# Altium footprint library LimeMicroAltiumLib.PcbLib: 876 footprints (part 56 of 57)
Each footprint in its own frame and in the unit in brackets; x right, y up, seen from the top. Pads: shape width x height; smd on the part's side, far side on the other; paste and mask are expansions set on the pad; w line width, h text height; cw(c..) or ccw(c..) is an arc to the next point about the centre after c.
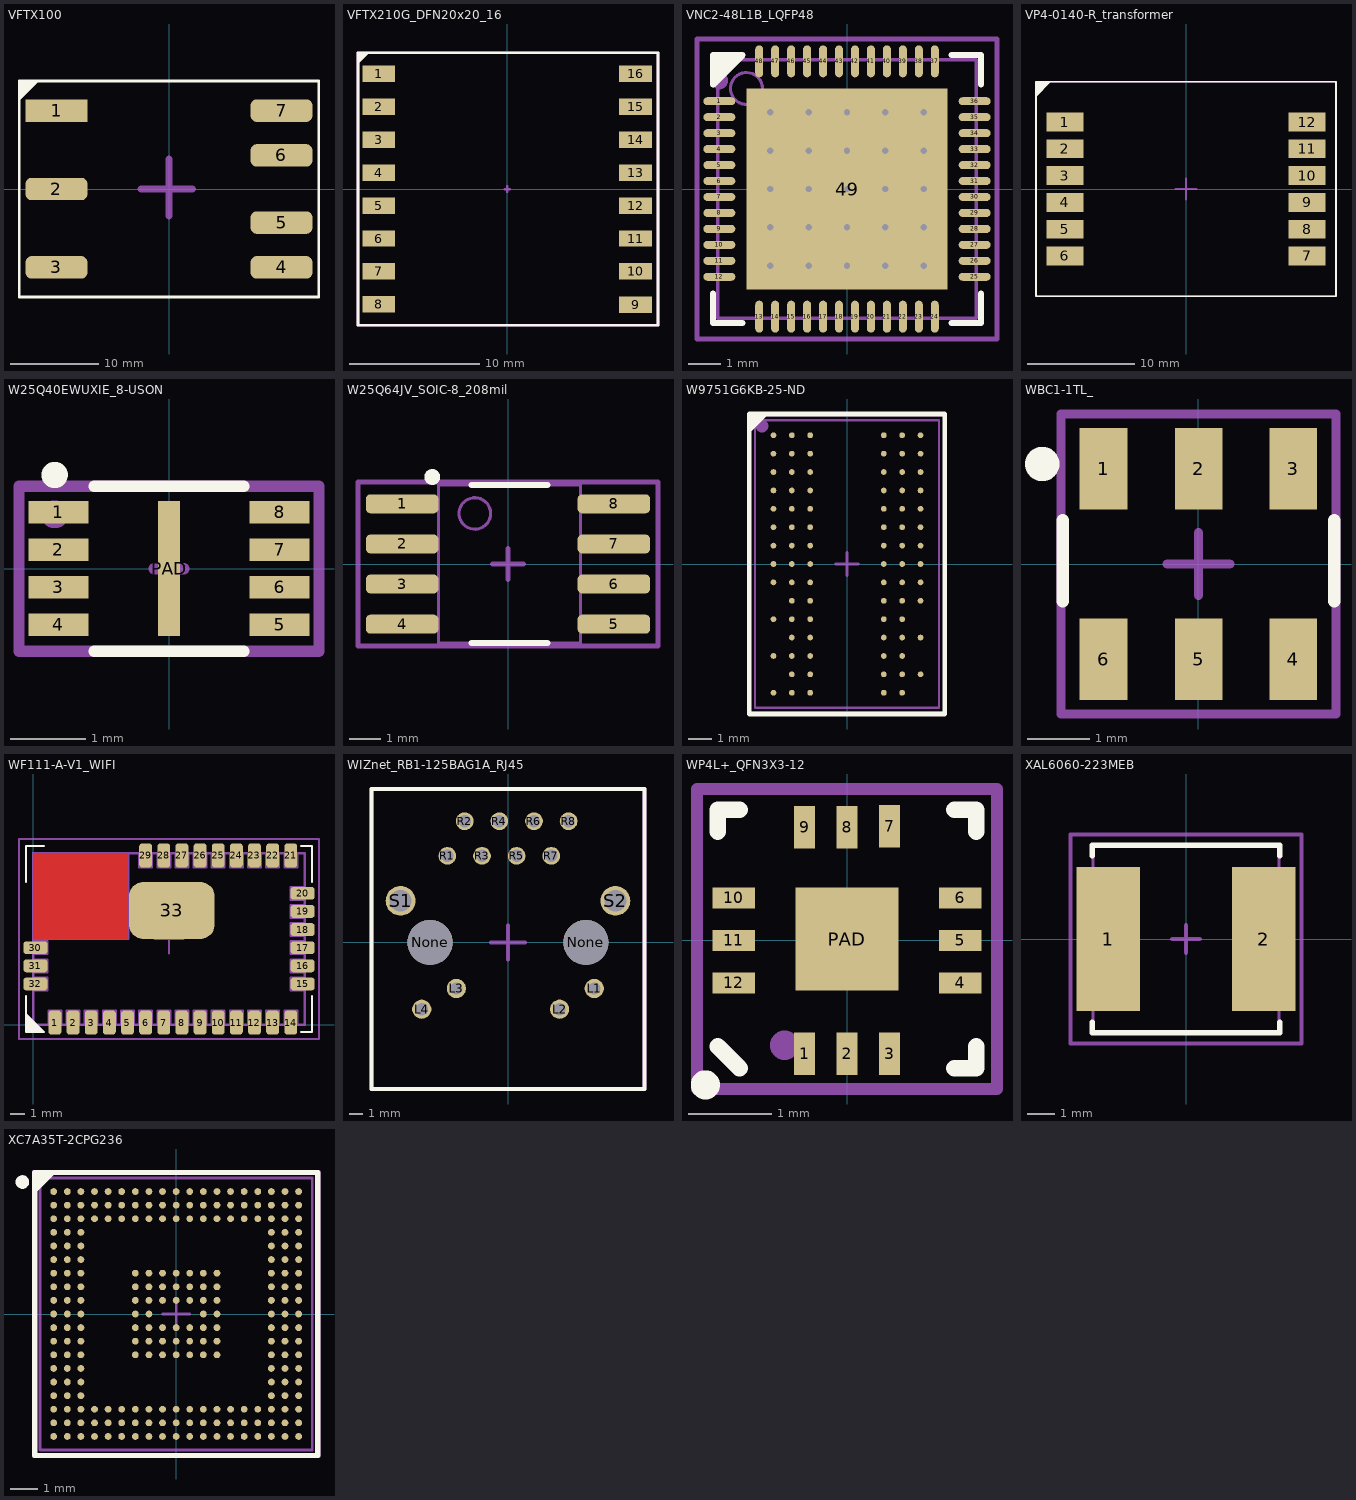
[diagram p55: the footprints below, top view; thin cyan lines are the x and y axes]

## uSpark_BODY_MECH [mm]
3D body "User Library-SMA Antenna.step": height 86.97, standoff 0, extent 52.475,-10.425 83.375,-0.425
3D body "User Library-SMA Antenna.step": height 86.97, standoff 0, extent 52.475,-24.75 83.375,-14.75
3D body "User Library-SMA Antenna.step": height 86.97, standoff 0, extent 52.475,3.325 83.375,13.325
3D body "User Library-SMA Antenna.step": height 86.97, standoff 0, extent 52.5,17.65 83.4,27.65
3D body "1455A1002.stp": height 9.37, standoff -2.63, extent -53.525,-34.611 52.475,35.391

## uSpark_BODY_PANEL_MECH [mm]
3D body: height 6, standoff 0, extent 50,-26 51.5,29
3D body "User Library-SMA-2.step": height 8.25, standoff -2.25, extent 23.85,-25.025 58.85,-14.525
3D body "User Library-SMA-2.step": height 8.25, standoff -2.25, extent 23.85,-10.7 58.85,-0.2
3D body "User Library-SMA-2.step": height 8.25, standoff -2.25, extent 23.85,3.05 58.85,13.55
3D body "User Library-SMA-2.step": height 8.25, standoff -2.25, extent 23.875,17.375 58.875,27.875
3D body "User Library-SMA Antenna.step": height 84.97, standoff -2, extent 52.475,-10.425 83.375,-0.425
3D body "User Library-SMA Antenna.step": height 84.97, standoff -2, extent 52.475,-24.75 83.375,-14.75
3D body "User Library-SMA Antenna.step": height 84.97, standoff -2, extent 52.475,3.325 83.375,13.325
3D body "User Library-SMA Antenna.step": height 84.97, standoff -2, extent 52.5,17.65 83.4,27.65

## VFTX100 [mm]
pads (7):
  rect 7x2.54 smd: 1(-12.763,8.89)
  rrect50% 7x2.54 smd: 2(-12.764,0) 3(-12.764,-8.89) 4(12.764,-8.89) 5(12.764,-3.81) 6(12.763,3.81) 7(12.764,8.89)
Top Overlay:
  region: -17,12.25 -14.75,12.25 -17,10
  lines w0.3: -17,-12.25 -17,12.25 17,12.25 17,-12.25 -17,-12.25
Mechanical 15:
  lines w0.2: -17.018,-12.25 -17.018,12.25 17.018,12.25 17.018,-12.25 -17.018,-12.25
  lines w0.8: -3.175,0.025 0,0.025 ; 0,-3.087 0,0 ; 0,3.429 0,0.025 ; 2.667,0.025 0,0.025
  text "7" at 12,8.25 h1
  text "4" at 12,-9.75 h1
  text "3" at -13.5,-9.5 h1
  text "1" at -13.5,7.75 h1
  text ".Designator" at 0,0 h3
3D body: height 6.73, standoff 0, extent -12.827,-11.176 12.827,11.176

## VFTX210G_DFN20x20_16 [mm]
pads (16):
  rect 2.54x1.27 smd: 1(-9.9,8.9) 2(-9.9,6.35) 3(-9.9,3.81) 4(-9.9,1.27) 5(-9.9,-1.27) 6(-9.9,-3.81) 7(-9.9,-6.35) 8(-9.9,-8.89) 9(9.9,-8.9) 10(9.9,-6.35) 11(9.9,-3.81) 12(9.9,-1.27) 13(9.9,1.27) 14(9.9,3.81) 15(9.9,6.35) 16(9.9,8.9)
Top Overlay:
  region: -11.5,9.65 -10.638,10.512 -11.5,10.513
  lines w0.2: -11.5,-10.5 -11.5,10.5 11.625,10.5 11.625,-10.5 -11.5,-10.5
Mechanical 15:
  circle w0.254: c-9.9,8.9 r0.106
  lines w0.2: -0.2,0 0,0 ; 0,-0.2 0,0 ; 0,0.2 0,0 ; 0.2,0 0,0 ; -11.5,-10.5 -11.5,10.5 11.625,10.5 11.625,-10.5 -11.5,-10.5
  text ".Designator" at 0,0 h0.55
  text "1" at 9.8,8.6 h0.55
3D body: height 6.01, standoff 0, extent -8.492,6.502 -6.5,8.498
3D body: height 6, standoff 0, extent -10,-10 10,10

## VNC2-48L1B_LQFP48 [mm] "VNC2-48L1B chip with LQFP-48 package"
pads (49):
  oval 1x0.25 smd mask+0.05: 1(-4,2.75) 2(-4,2.25) 3(-4,1.75) 4(-4,1.25) 5(-4,0.75) 6(-4,0.25) 7(-4,-0.25) 8(-4,-0.75) 9(-4,-1.25) 10(-4,-1.75) 11(-4,-2.25) 12(-4,-2.75) 25(4,-2.75) 26(4,-2.25) 27(4,-1.75) 28(4,-1.25) 29(4,-0.75) 30(4,-0.25) 31(4,0.25) 32(4,0.75) 33(4,1.25) 34(4,1.75) 35(4,2.25) 36(4,2.75)
  oval 0.25x1 smd mask+0.05: 13(-2.75,-4) 14(-2.25,-4) 15(-1.75,-4) 16(-1.25,-4) 17(-0.75,-4) 18(-0.25,-4) 19(0.25,-4) 20(0.75,-4) 21(1.25,-4) 22(1.75,-4) 23(2.25,-4) 24(2.75,-4) 37(2.75,4) 38(2.25,4) 39(1.75,4) 40(1.25,4) 41(0.75,4) 42(0.25,4) 43(-0.25,4) 44(-0.75,4) 45(-1.25,4) 46(-1.75,4) 47(-2.25,4) 48(-2.75,4)
  rect 6.3x6.3 smd: 49(0,0)
via -2.4,2.4 diameter 0.4 hole 0.2
via -1.2,2.4 diameter 0.4 hole 0.2
via 0,2.4 diameter 0.4 hole 0.2
via 1.2,2.4 diameter 0.4 hole 0.2
via 2.4,2.4 diameter 0.4 hole 0.2
via -2.4,1.2 diameter 0.4 hole 0.2
via -1.2,1.2 diameter 0.4 hole 0.2
via 0,1.2 diameter 0.4 hole 0.2
via 1.2,1.2 diameter 0.4 hole 0.2
via 2.4,1.2 diameter 0.4 hole 0.2
via -2.4,0 diameter 0.4 hole 0.2
via -1.2,0 diameter 0.4 hole 0.2
via 0,0 diameter 0.4 hole 0.2
via 1.2,0 diameter 0.4 hole 0.2
via 2.4,0 diameter 0.4 hole 0.2
via -2.4,-1.2 diameter 0.4 hole 0.2
via -1.2,-1.2 diameter 0.4 hole 0.2
via 0,-1.2 diameter 0.4 hole 0.2
via 1.2,-1.2 diameter 0.4 hole 0.2
via 2.4,-1.2 diameter 0.4 hole 0.2
via -2.4,-2.4 diameter 0.4 hole 0.2
via -1.2,-2.4 diameter 0.4 hole 0.2
via 0,-2.4 diameter 0.4 hole 0.2
via 1.2,-2.4 diameter 0.4 hole 0.2
via 2.4,-2.4 diameter 0.4 hole 0.2
Top Overlay:
  region: -4.2,3.2 -3.2,4.2 -4.2,4.2
  lines w0.2: -4.2,-3.275 -4.2,-4.2 -3.275,-4.2 ; 3.275,-4.2 4.2,-4.2 4.2,-3.275 ; 3.275,4.2 4.2,4.2 4.2,3.275 ; -4.2,3.275 -3.275,4.2 -4.2,4.2 -4.2,3.275
Mechanical 13:
  circle w0.1: c-3.15,3.15 r0.5
  lines w0.1: -4.05,-4.05 -4.05,4.05 4.05,4.05 4.05,-4.05 -4.05,-4.05
Mechanical 15:
  circle w0.35: c-4,3.4 r0.1
  lines w0.15: -0.5,0 0.5,0 ; 0,-0.5 0,0.5 ; -4.7,-4.7 -4.7,4.7 4.7,4.7 4.7,-4.7 -4.7,-4.7
  text ".Designator" at 0,0 h0.55
3D body: height 1, standoff 0, extent -4.05,-4.05 4.05,4.05

## VP4-0140-R_transformer [mm]
pads (12):
  rect 3.43x1.75 smd mask+0.05: 1(-11.3,6.25) 2(-11.3,3.75) 3(-11.3,1.25) 4(-11.3,-1.25) 5(-11.3,-3.75) 6(-11.3,-6.25) 7(11.3,-6.25) 8(11.3,-3.75) 9(11.3,-1.25) 10(11.3,1.25) 11(11.3,3.75) 12(11.3,6.25)
Top Overlay:
  region: -14,8.625 -12.625,10 -14,10
  lines w0.15: -14,-10 14,-10 14,10 -14,10 -14,-10
Mechanical 15:
  lines w0.15: -1,0 1,0 ; 0,-1 0,1 ; -14,-10 14,-10 14,10 -14,10 -14,-10
  text ".Designator" at 0,0 h0.55
  text "1" at -11.5,6 h0.55
  text "6" at -11.5,-6.5 h0.55
  text "7" at 11.5,-6.5 h0.55
  text "12" at 11.5,6 h0.55
3D body: height 2, standoff 0, extent 9,5.9 12.3,6.6
3D body: height 2, standoff 0, extent 9,3.4 12.3,4.1
3D body: height 2, standoff 0, extent 9,0.9 12.3,1.6
3D body: height 2, standoff 0, extent 9,-1.6 12.3,-0.9
3D body: height 2, standoff 0, extent 9,-4.1 12.3,-3.4
3D body: height 2, standoff 0, extent 9,-6.6 12.3,-5.9
3D body: height 2, standoff 0, extent -12.3,-6.6 -9,-5.9
3D body: height 2, standoff 0, extent -12.3,-4.1 -9,-3.4
3D body: height 2, standoff 0, extent -12.3,-1.6 -9,-0.9
3D body: height 2, standoff 0, extent -12.3,0.9 -9,1.6
3D body: height 2, standoff 0, extent -12.3,3.4 -9,4.1
3D body: height 2, standoff 0, extent -12.3,5.9 -9,6.6
3D body: height 10, standoff 0, extent -9,-9 9,9

## W25Q40EWUXIE_8-USON [mm]
pads (9):
  rect 0.8x0.3 smd mask+0.05: 1(-1.475,0.75) 2(-1.475,0.25) 3(-1.475,-0.25) 4(-1.475,-0.75) 5(1.475,-0.75) 6(1.475,-0.25) 7(1.475,0.25) 8(1.475,0.75)
  rect 0.3x1.8 smd mask+0.05: PAD(0,0)
Top Overlay:
  circle w0.3: c-1.525,1.25 r0.025
  lines w0.15: -1,-1.1 1,-1.1 ; -1,1.1 1,1.1
Mechanical 15:
  circle w0.3: c-1.525,0.725 r0.035
  lines w0.15: -0.2,0 0.2,0 ; 0,-0.2 0,0.2 ; -2,-1.1 -2,1.1 2,1.1 2,-1.1 -2,-1.1
  text ".Designator" at 0,0 h0.55
3D body "User Library-8MA3.step": height 0.6, standoff 0, extent -1.51,-1 1.51,1

## W25Q64JV_SOIC-8_208mil [mm] "8-Pin Small Outline Integrated Circuit 1.27 mm Pitch"
height 1.55
pads (8):
  rrect50% 2.3x0.6 smd: 1(-3.35,1.905) 2(-3.35,0.635) 3(-3.35,-0.635) 4(-3.35,-1.905) 5(3.35,-1.905) 6(3.35,-0.635) 7(3.35,0.635) 8(3.35,1.905)
Top Overlay:
  circle w0.25: c-2.4,2.755 r0.125
  lines w0.2: -1.15,-2.5 1.25,-2.5 ; -1.15,2.5 1.25,2.5
Mechanical 13:
  circle w0.1: c-1.05,1.6 r0.5
  lines w0.1: -2.2,-2.5 -2.2,2.5 2.3,2.5 2.3,-2.5 -2.2,-2.5
Mechanical 15:
  circle w0.35: c-3.05,1.9 r0.1
  lines w0.15: -0.5,0 0.5,0 ; 0,-0.5 0,0.5 ; -4.75,-2.6 -4.75,2.6 4.75,2.6 4.75,-2.6 -4.75,-2.6
  text ".Designator" at 0,0 h0.55
3D body "User Library-SOIC8_Wide_5mmx5mm.step": height 1.75, standoff -0.01, extent -4.002,-2.73 4.1,2.73

## W9751G6KB-25-ND [mm] "BGA, 84-Leads, Body 8,00x12,50mmx1,20mm, Pitch 0,80mm"
height 1.2
pads (84):
  round 0.25 smd: A1(-3.2,5.6) A2(-2.4,5.6) A3(-1.6,5.6) A7(1.6,5.6) A8(2.4,5.6) A9(3.2,5.6) B1(-3.2,4.8) B2(-2.4,4.8) B3(-1.6,4.8) B7(1.6,4.8) B8(2.4,4.8) B9(3.2,4.8) C1(-3.2,4) C2(-2.4,4) C3(-1.6,4) C7(1.6,4) C8(2.4,4) C9(3.2,4) D1(-3.2,3.2) D2(-2.4,3.2) D3(-1.6,3.2) D7(1.6,3.2) D8(2.4,3.2) D9(3.2,3.2) E1(-3.2,2.4) E2(-2.4,2.4) E3(-1.6,2.4) E7(1.6,2.4) E8(2.4,2.4) E9(3.2,2.4) F1(-3.2,1.6) F2(-2.4,1.6) F3(-1.6,1.6) F7(1.6,1.6) F8(2.4,1.6) F9(3.2,1.6) G1(-3.2,0.8) G2(-2.4,0.8) G3(-1.6,0.8) G7(1.6,0.8) G8(2.4,0.8) G9(3.2,0.8) H1(-3.2,0) H2(-2.4,0) H3(-1.6,0) H7(1.6,0) H8(2.4,0) H9(3.2,0) J1(-3.2,-0.8) J2(-2.4,-0.8) J3(-1.6,-0.8) J7(1.6,-0.8) J8(2.4,-0.8) J9(3.2,-0.8) K2(-2.4,-1.6) K3(-1.6,-1.6) K7(1.6,-1.6) K8(2.4,-1.6) K9(3.2,-1.6) L1(-3.2,-2.4) L2(-2.4,-2.4) L3(-1.6,-2.4) L7(1.6,-2.4) L8(2.4,-2.4) M2(-2.4,-3.2) M3(-1.6,-3.2) M7(1.6,-3.2) M8(2.4,-3.2) M9(3.2,-3.2) N1(-3.2,-4) N2(-2.4,-4) N3(-1.6,-4) N7(1.6,-4) N8(2.4,-4) P2(-2.4,-4.8) P3(-1.6,-4.8) P7(1.6,-4.8) P8(2.4,-4.8) P9(3.2,-4.8) R1(-3.2,-5.6) R2(-2.4,-5.6) R3(-1.6,-5.6) R7(1.6,-5.6) R8(2.4,-5.6)
Top Overlay:
  region: -3.542,6.525 -4.25,5.817 -4.25,6.525
  lines w0.2: -4.25,5.817 -3.542,6.525 ; -4.25,-6.525 -4.25,6.525 4.25,6.525 4.25,-6.525 -4.25,-6.525
Mechanical 13:
  lines w0.1: -4,-6.25 -4,6.25 4,6.25 4,-6.25 -4,-6.25
Mechanical 15:
  circle w0.35: c-3.7,6 r0.1
  lines w0.15: -0.5,0 0,0 ; 0,-0.5 0,0 ; 0,0.5 0,0 ; 0.5,0 0,0 ; -4.25,-6.5 -4.25,6.5 4.25,6.5 4.25,-6.5 -4.25,-6.5
  text ".Designator" at 0,0 h0.55
3D body: height 1.2, standoff 0.25, extent -4,-6.25 4,6.25

## WBC1-1TL_ [mm]
pads (6):
  rect 0.76x1.3 smd: 1(-1.52,1.525) 2(0,1.525) 3(1.52,1.525) 4(1.52,-1.525) 5(0,-1.525) 6(-1.52,-1.525)
Top Overlay:
  circle w0.35: c-2.5,1.6 r0.1
  lines w0.2: -2.175,-0.6 -2.175,0.7 ; 2.175,-0.6 2.175,0.7
Mechanical 15:
  circle w0.35: c-1.52,1.565 r0.1
  lines w0.15: -0.5,0 0,0 ; 0,-0.5 0,0 ; 0,0.5 0,0 ; 0.5,0 0,0 ; -2.2,-2.4 2.2,-2.4 2.2,2.4 -2.2,2.4 -2.2,-2.4
  text ".designator" at 0,0 h0.55
3D body "User Library-LQW2BH.step": height 2.8, standoff 1, extent -0.75,-1 0.75,1
3D body: height 1, standoff 0, extent -1.275,-1.612 1.275,1.613

## WF111-A-V1_WIFI [mm]
pads (33):
  rrect50% 0.9x1.7 smd mask+0.05: 1(1.515,0.15) 2(2.785,0.15) 3(4.055,0.15) 4(5.325,0.15) 5(6.595,0.15) 6(7.865,0.15) 7(9.135,0.15) 8(10.405,0.15) 9(11.675,0.15) 10(12.945,0.15) 11(14.215,0.15) 12(15.485,0.15) 13(16.755,0.15) 14(18.025,0.15) 21(18.025,11.85) 22(16.755,11.85) 23(15.485,11.85) 24(14.215,11.85) 25(12.945,11.85) 26(11.675,11.85) 27(10.405,11.85) 28(9.135,11.85) 29(7.865,11.85)
  rrect50% 1.7x0.9 smd mask+0.05: 15(18.85,2.85) 16(18.85,4.12) 17(18.85,5.39) 18(18.85,6.66) 19(18.85,7.93) 20(18.85,9.2) 30(0.15,5.39) 31(0.15,4.12) 32(0.15,2.85)
  rrect50% 6x4 smd mask+0.05: 33(9.7,8)
Top Layer:
  pour cut-out: 0,6 0,12 6.6,12 6.6,6
Top Overlay:
  region: 0.8,-0.5 -0.5,0.8 -0.5,-0.5
  lines w0.15: -0.5,2 -0.5,-0.5 0.75,-0.5 ; -0.5,10 -0.5,12.5 0.75,12.5 ; 18.75,-0.5 19.5,-0.5 19.5,2 ; 18.75,12.5 19.5,12.5 19.5,10
Mechanical 13:
  lines w0.15: 0,6 6.665,6 ; 0,6.6 5.4,12 ; 0,7.9 4.1,12 ; 0,9.2 2.8,12 ; 0,10.5 1.5,12 ; 0.7,6 6.7,12 ; 2,6 6.65,10.65 ; 3.3,6 6.65,9.35 ; 4.6,6 6.65,8.05 ; 5.9,6 6.632,6.732 ; 6.665,6.085 6.665,12 ; 0,0 0,12 19,12 19,0 0,0 ; 0,2.4 0,3.3 1,3.3 1,2.4 0,2.4 ; 0,3.67 1,3.67 1,4.57 0,4.57 0,3.67 ; 0,4.94 1,4.94 1,5.84 0,5.84 0,4.94 ; 1.065,0 1.965,0 1.965,1 1.065,1 1.065,0 ; 2.335,0 3.235,0 3.235,1 2.335,1 2.335,0 ; 3.605,0 3.605,1 4.505,1 4.505,0 3.605,0 ; 4.875,0 4.875,1 5.775,1 5.775,0 4.875,0 ; 6.145,0 6.145,1 7.045,1 7.045,0 6.145,0 ; 7.415,0 7.415,1 8.315,1 8.315,0 7.415,0 ; 7.415,11 8.315,11 8.315,12 7.415,12 7.415,11 ; 8.685,0 8.685,1 9.585,1 9.585,0 8.685,0 ; 8.685,11 9.585,11 9.585,12 8.685,12 8.685,11 ; 9.955,0 9.955,1 10.855,1 10.855,0 9.955,0 ; 9.955,11 10.855,11 10.855,12 9.955,12 9.955,11 ; 11.225,0 12.125,0 12.125,1 11.225,1 11.225,0 ; 11.225,11 11.225,12 12.125,12 12.125,11 11.225,11 ; 12.495,0 13.395,0 13.395,1 12.495,1 12.495,0 ; 12.495,11 12.495,12 13.395,12 13.395,11 12.495,11 ; 13.765,0 14.665,0 14.665,1 13.765,1 13.765,0 ; 13.765,11 13.765,12 14.665,12 14.665,11 13.765,11 ; 15.035,0 15.935,0 15.935,1 15.035,1 15.035,0 ; 15.035,11 15.035,12 15.935,12 15.935,11 15.035,11 ; 16.305,0 17.205,0 17.205,1 16.305,1 16.305,0 ; 16.305,11 16.305,12 17.205,12 17.205,11 16.305,11 ; 17.575,0 17.575,1 18.475,1 18.475,0 17.575,0 ; 17.575,11 18.475,11 18.475,12 17.575,12 17.575,11 ; 18,2.4 18,3.3 19,3.3 19,2.4 18,2.4 ; 18,3.67 19,3.67 19,4.57 18,4.57 18,3.67 ; 18,4.94 19,4.94 19,5.84 18,5.84 18,4.94 ; 18,6.21 19,6.21 19,7.11 18,7.11 18,6.21 ; 18,7.48 19,7.48 19,8.38 18,8.38 18,7.48 ; 18,8.75 19,8.75 19,9.65 18,9.65 18,8.75
  text "NO GND" at 2.1,8.5 h0.55
Mechanical 15:
  lines w0.15: 8.5,6 9.5,6 ; 9.5,5 9.5,6 ; 9.5,7 9.5,6 ; 10.5,6 9.5,6 ; -1,-1 20,-1 20,13 -1,13 -1,-1
  text ".Designator" at 9.5,6 h0.55
  text "1" at 1.25,-0.25 h0.55
  text "14" at 17.5,-0.25 h0.55
  text "21" at 17.5,11.25 h0.55
  text "29" at 7.25,11.25 h0.55
3D body: height 2, standoff 0.8, extent 0.225,9.725 1.225,11.725
3D body: height 2, standoff 0.8, extent 6.75,1.25 19,10.75
3D body: height 0.8, standoff 0, extent 0,0 19,12

## WIZnet_RB1-125BAG1A_RJ45 [mm]
pads (16):
  round 1.408 hole 0.9: L1(6.325,-3.38) L2(3.784,-4.899) L3(-3.786,-3.379) L4(-6.325,-4.9)
  round 3.3 hole 3.3 unplated: None(-5.716,-0.001) None(5.714,-0.001)
  round 1.3 hole 0.9: R1(-4.446,6.349) R2(-3.176,8.889) R3(-1.906,6.349) R4(-0.636,8.889) R5(0.634,6.349) R6(1.904,8.889) R7(3.174,6.349) R8(4.444,8.889)
  round 2.184 hole 1.6: S1(-7.876,3.049) S2(7.874,3.049)
Top Overlay:
  lines w0.3: -10,-10.75 -10,11.25 10,11.25 10,-10.75 -10,-10.75
Mechanical 15:
  lines w0.3: -1.25,0 1.25,0 ; 0,-1.25 0,1.25 ; -10,-10.75 10,-10.75 10,11.25 -10,11.25 -10,-10.75
  text ".Designator" at 0,0 h0.55
  text "R1" at -4.75,6 h0.55
  text "R8" at 4,8.75 h0.55
  text "L1" at 6.25,-3.75 h0.55
  text "L4" at -6.75,-5.25 h0.55
  text "L3" at -4,-3.5 h0.55
  text "L2" at 3.5,-5.25 h0.55
3D body "User Library-J1B1211CCD.step": height 14.36, standoff -3.95, extent -9.019,-10.7 9,10.6

## WP4L+_QFN3X3-12 [mm] "Quad Flat No Lead, Plastic; 16 Terminals; Body 3 x 3 mm; Pitch 0.5 mm"
height 0.8
pads (13):
  rect 0.25x0.51 smd mask+0.05: 1(-0.51,-1.36) 2(0,-1.36) 3(0.51,-1.36) 7(0.51,1.37) 8(0,1.36) 9(-0.51,1.36)
  rect 0.51x0.25 smd mask+0.05: 4(1.36,-0.51) 5(1.36,0) 6(1.36,0.51) 10(-1.36,0.51) 11(-1.36,0) 12(-1.36,-0.51)
  rect 1.24x1.24 smd mask+0.05: PAD(0,0.017)
Top Overlay:
  circle w0.25: c-1.7,-1.733 r0.05
  lines w0.2: -1.55,-1.272 -1.29,-1.532 ; -1.55,1.308 -1.55,1.568 -1.29,1.568 ; 1.29,-1.532 1.55,-1.532 1.55,-1.272 ; 1.29,1.568 1.55,1.568 1.55,1.308
Mechanical 15:
  circle w0.3: c-0.75,-1.258 r0.025
  lines w0.15: -0.475,0.017 0,0.017 ; 0,-0.458 0,0.017 ; 0,0.492 0,0.017 ; 0.475,0.017 0,0.017 ; -1.8,-1.783 1.8,-1.783 1.8,1.817 -1.8,1.817 -1.8,-1.783
  text ".Designator" at 0,0.017 h0.55
3D body "User Library-QFN12_3x3x0_8.STEP": height 0.78, standoff -0.02, extent -1.51,-1.492 1.51,1.528

## WurthElectronic_RF_shield [mm] "Man. part nr.: 36003250"
height 3
3D body: height 2.8, standoff 0.1, extent 0.3,0 26.5,0.3
3D body: height 2.8, standoff 0.1, extent 0,0 0.3,26.5
3D body: height 2.8, standoff 0.1, extent 0,26.5 26.5,26.8
3D body: height 3.1, standoff 2.8, extent 0,0 26.8,26.8
3D body: height 2.8, standoff 0.1, extent 26.5,0 26.8,26.8

## XAL6060-223MEB [mm] "Precision Wire Wound Inductor, 2-Leads, Body 6,56x6,56mm, IPC Medium Density"
height 6.1
pads (2):
  rect 2.3x5.25 smd: 1(-2.825,0) 2(2.825,0)
Top Overlay:
  lines w0.2: -3.4,-3.025 -3.4,-3.4 3.4,-3.4 3.4,-3.025 ; -3.4,3.025 -3.4,3.4 3.4,3.4 3.4,3.025
Mechanical 13:
  lines w0.1: -3.38,-3.38 -3.38,3.38 3.38,3.38 3.38,-3.38 -3.38,-3.38
Mechanical 15:
  lines w0.15: -0.5,0 0.5,0 ; 0,-0.5 0,0.5 ; -4.2,-3.8 -4.2,3.8 4.2,3.8 4.2,-3.8 -4.2,-3.8
  text "no polarity" at -2.475,-2.025 h0.55
  text ".Designator" at 0,0 h0.55
3D body "Cooper Bussman DR73 Series Inductor.STEP": height 3.55, standoff 0, extent -3.8,-3.8 3.8,3.8

## XC7A35T-2CPG236 [mm]
pads (238):
  round 0.25 smd mask+0.05: A1(-4.5,4.5) A2(-4,4.5) A3(-3.5,4.5) A4(-3,4.5) A5(-2.5,4.5) A6(-2,4.5) A7(-1.5,4.5) A8(-1,4.5) A9(-0.5,4.5) A10(0,4.5) A11(0.5,4.5) A12(1,4.5) A13(1.5,4.5) A14(2,4.5) A15(2.5,4.5) A16(3,4.5) A17(3.5,4.5) A18(4,4.5) A19(4.5,4.5) B1(-4.5,4) B2(-4,4) B3(-3.5,4) B4(-3,4) B5(-2.5,4) B6(-2,4) B7(-1.5,4) B8(-1,4) B9(-0.5,4) B10(0,4) B11(0.5,4) B12(1,4) B13(1.5,4) B14(2,4) B15(2.5,4) B16(3,4) B17(3.5,4) B18(4,4) B19(4.5,4) C1(-4.5,3.5) C2(-4,3.5) C3(-3.5,3.5) C4(-3,3.5) C5(-2.5,3.5) C6(-2,3.5) C7(-1.5,3.5) C8(-1,3.5) C9(-0.5,3.5) C10(0,3.5) C11(0.5,3.5) C12(1,3.5) C13(1.5,3.5) C14(2,3.5) C15(2.5,3.5) C16(3,3.5) C17(3.5,3.5) C18(4,3.5) C19(4.5,3.5) D1(-4.5,3) D2(-4,3) D3(-3.5,3) D17(3.5,3) D18(4,3) D19(4.5,3) E1(-4.5,2.5) E2(-4,2.5) E3(-3.5,2.5) E17(3.5,2.5) E18(4,2.5) E19(4.5,2.5) F1(-4.5,2) F2(-4,2) F3(-3.5,2) F17(3.5,2) F18(4,2) F19(4.5,2) G1(-4.5,1.5) G2(-4,1.5) G3(-3.5,1.5) G7(-1.5,1.5) G8(-1,1.5) G9(-0.5,1.5) G10(0,1.5) G11(0.5,1.5) G12(1,1.5) G13(1.5,1.5) G17(3.5,1.5) G18(4,1.5) G19(4.5,1.5) H1(-4.5,1) H2(-4,1) H3(-3.5,1) H7(-1.5,1) H8(-1,1) H9(-0.5,1) H10(0,1) H11(0.5,1) H12(1,1) H13(1.5,1) H17(3.5,1) H18(4,1) H19(4.5,1) J1(-4.5,0.5) J2(-4,0.5) J3(-3.5,0.5) J7(-1.5,0.5) J8(-1,0.5) J9(-0.5,0.5) J10(0,0.5) J11(0.5,0.5) J12(1,0.5) J13(1.5,0.5) J17(3.5,0.5) J18(4,0.5) J19(4.5,0.5) K1(-4.5,0) K2(-4,0) K3(-3.5,0) K7(-1.5,0) K8(-1,0) K12(1,0) K13(1.5,0) K17(3.5,0) K18(4,0) K19(4.5,0) L1(-4.5,-0.5) L2(-4,-0.5) L3(-3.5,-0.5) L7(-1.5,-0.5) L8(-1,-0.5) L9(-0.5,-0.5) L10(0,-0.5) L11(0.5,-0.5) L12(1,-0.5) L13(1.5,-0.5) L17(3.5,-0.5) L18(4,-0.5) L19(4.5,-0.5) M1(-4.5,-1) M2(-4,-1) M3(-3.5,-1) M7(-1.5,-1) M8(-1,-1) M9(-0.5,-1) M10(0,-1) M11(0.5,-1) M12(1,-1) M13(1.5,-1) M17(3.5,-1) M18(4,-1) M19(4.5,-1) N1(-4.5,-1.5) N2(-4,-1.5) N3(-3.5,-1.5) N7(-1.5,-1.5) N8(-1,-1.5) N9(-0.5,-1.5) N10(0,-1.5) N11(0.5,-1.5) N12(1,-1.5) N13(1.5,-1.5) N17(3.5,-1.5) N18(4,-1.5) N19(4.5,-1.5) P1(-4.5,-2) P2(-4,-2) P3(-3.5,-2) P17(3.5,-2) P18(4,-2) P19(4.5,-2) R1(-4.5,-2.5) R2(-4,-2.5) R3(-3.5,-2.5) R17(3.5,-2.5) R18(4,-2.5) R19(4.5,-2.5) T1(-4.5,-3) T2(-4,-3) T3(-3.5,-3) T17(3.5,-3) T18(4,-3) T19(4.5,-3) U1(-4.5,-3.5) U2(-4,-3.5) U3(-3.5,-3.5) U4(-3,-3.5) U5(-2.5,-3.5) U6(-2,-3.5) U7(-1.5,-3.5) U8(-1,-3.5) U9(-0.5,-3.5) U10(0,-3.5) U11(0.5,-3.5) U12(1,-3.5) U13(1.5,-3.5) U14(2,-3.5) U15(2.5,-3.5) U16(3,-3.5) U17(3.5,-3.5) U18(4,-3.5) U19(4.5,-3.5) V1(-4.5,-4) V2(-4,-4) V3(-3.5,-4) V4(-3,-4) V5(-2.5,-4) V6(-2,-4) V7(-1.5,-4) V8(-1,-4) V9(-0.5,-4) V10(0,-4) V11(0.5,-4) V12(1,-4) V13(1.5,-4) V14(2,-4) V15(2.5,-4) V16(3,-4) V17(3.5,-4) V18(4,-4) V19(4.5,-4) W1(-4.5,-4.5) W2(-4,-4.5) W3(-3.5,-4.5) W4(-3,-4.5) W5(-2.5,-4.5) W6(-2,-4.5) W7(-1.5,-4.5) W8(-1,-4.5) W9(-0.5,-4.5) W10(0,-4.5) W11(0.5,-4.5) W12(1,-4.5) W13(1.5,-4.5) W14(2,-4.5) W15(2.5,-4.5) W16(3,-4.5) W17(3.5,-4.5) W18(4,-4.5) W19(4.5,-4.5)
Top Overlay:
  circle w0.25: c-5.65,4.85 r0.125
  region: -4.542,5.2 -5.2,4.542 -5.2,5.2
  lines w0.2: -5.2,4.542 -4.542,5.2 ; -5.2,-5.2 5.2,-5.2 5.2,5.2 -5.2,5.2 -5.2,-5.2
Mechanical 13:
  lines w0.102: -5,-5 5,-5 5,5 -5,5 -5,-5
Mechanical 15:
  lines w0.1: -0.5,0 0.5,0 ; 0,-0.5 0,0.5 ; -5.25,-5.25 5.25,-5.25 5.25,5.25 -5.25,5.25 -5.25,-5.25
  text "W1" at -4.9,-4.9 h0.4
  text "W19" at 3.9,-4.9 h0.4
  text "A19" at 4,4.4 h0.4
  text "A1" at -4.8,4.4 h0.4
  text ".Designator" at 0,0 h0.55
3D body: height 1.38, standoff 0.17, extent -5,-5 5,5
3D body: height 1.39, standoff 0, extent -4.699,4.101 -4.101,4.699